# EAGLE library part IC_DS2450 (library dp_devices.v6)
1-wire quad A/D Converter
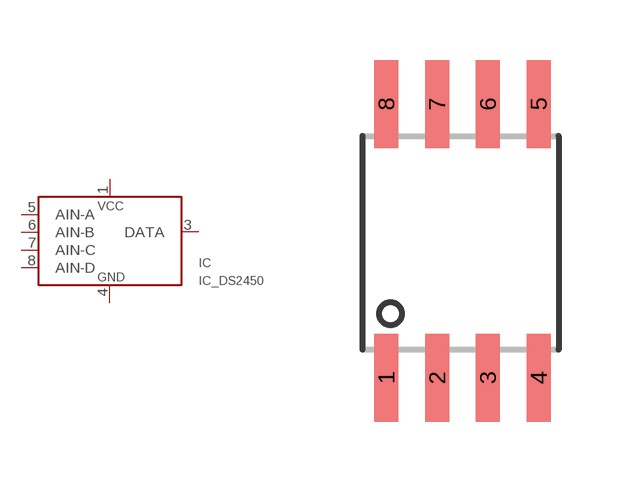
[diagram p193: symbol with the pads of SOIC-8W; footprint SOIC-8W]

Designator prefix IC

## IC_DS2450  [SOIC-8W]
1  VCC  sup
3  DATA
4  GND  sup
5  AIN-A  in
6  AIN-B  in
7  AIN-C  in
8  AIN-D  in

## Footprint SOIC-8W (pad centres in mm)
width: 208 mil (5.28 mm)
smd 0.6 x 2.2: 1 -1.905,-3.376; 2 -0.635,-3.376; 3 0.635,-3.376; 4 1.905,-3.376; 5 1.905,3.475; 6 0.635,3.475; 7 -0.635,3.475; 8 -1.905,3.475